# Altium footprint library Connectors.PcbLib: 305 footprints (part 19 of 20)
Each footprint in its own frame and in the unit in brackets; x right, y up, seen from the top. Pads: shape width x height; smd on the part's side, far side on the other; paste and mask are expansions set on the pad; w line width, h text height; cw(c..) or ccw(c..) is an arc to the next point about the centre after c.
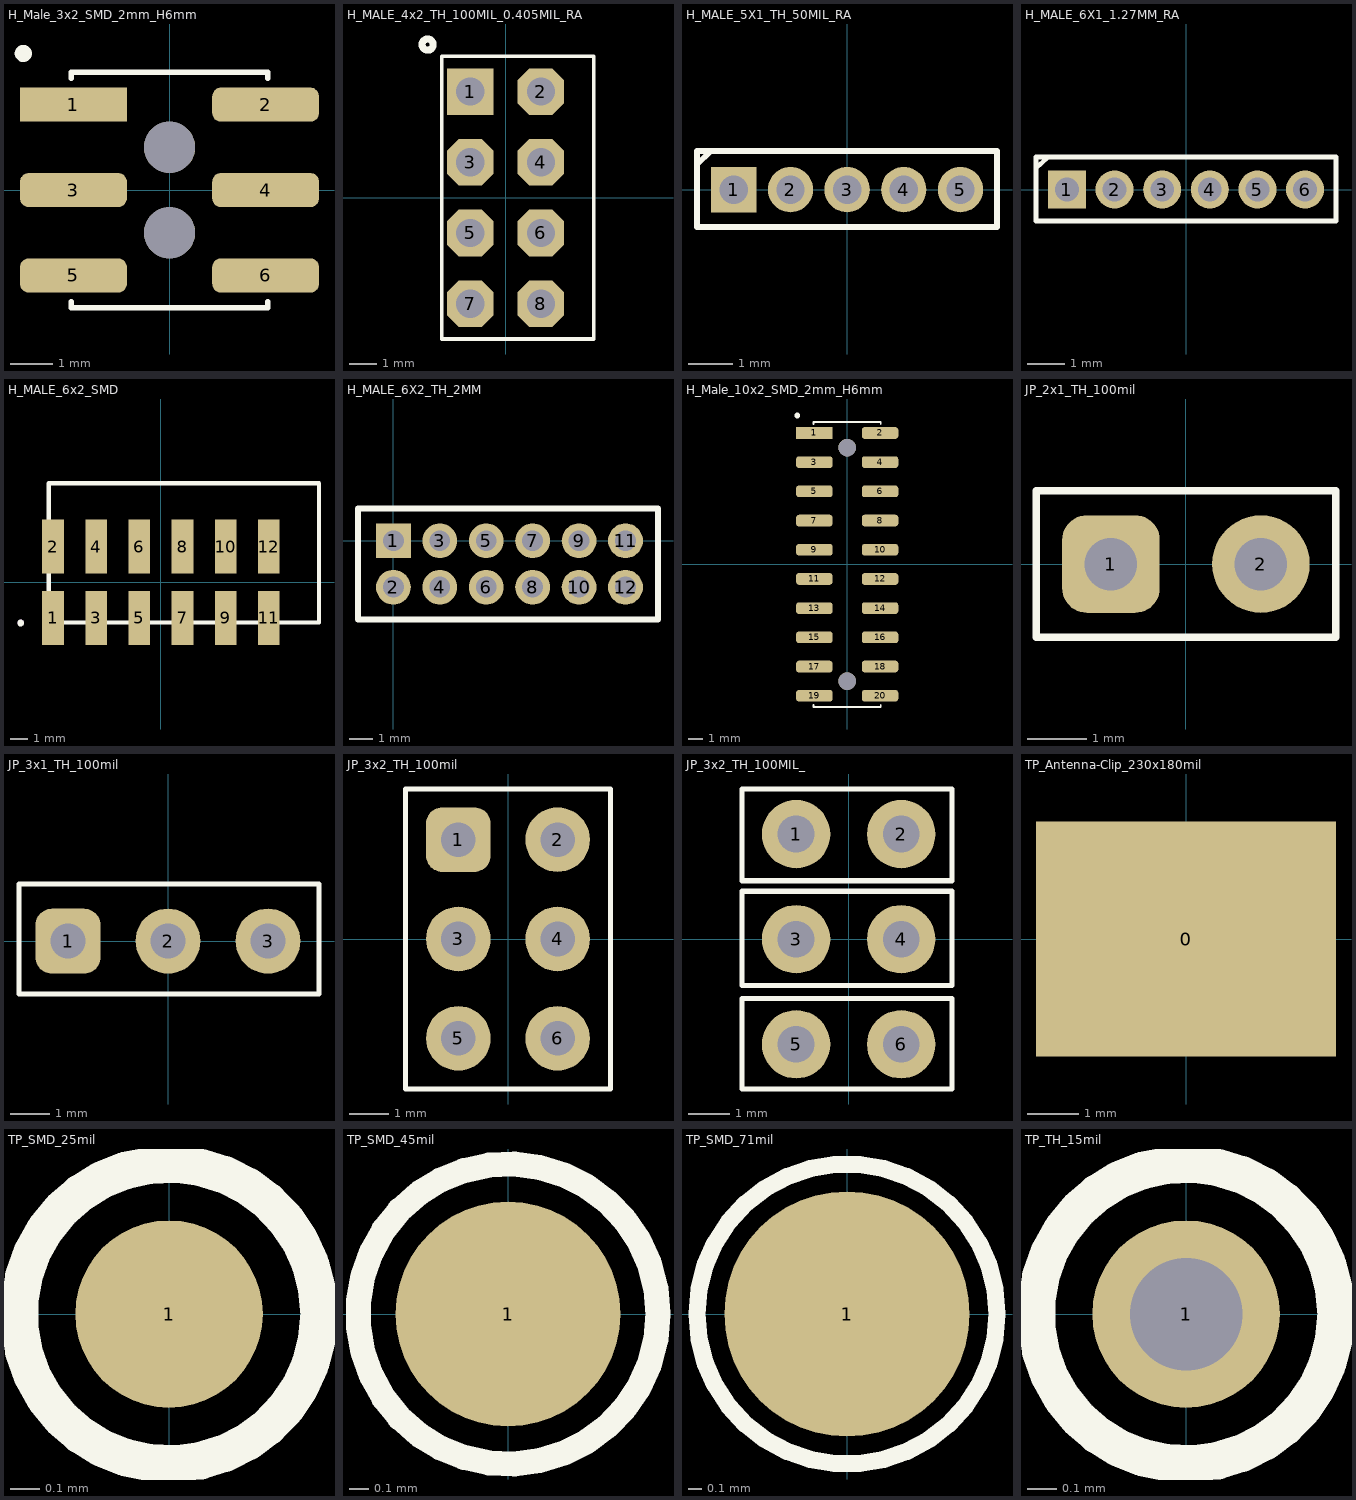
[diagram p18: the footprints below, top view; thin cyan lines are the x and y axes]

## H_Male_3x2_SMD_2mm_H6mm [mm] "/20230621/J-A.Sepulveda"
pads (8):
  rect 2.5x0.8 smd: 1(-2.25,2)
  rrect50% 2.5x0.8 smd: 2(2.25,2) 3(-2.25,0) 4(2.25,0) 5(-2.25,-2) 6(2.25,-2)
  round 1.2 hole 1.2 unplated: ""(0,-1) ""(0,1)
Top Overlay:
  circle w0.2: c-3.425,3.2 r0.1
  lines w0.127: -2.3,-2.62 -2.3,-2.76 2.3,-2.76 2.3,-2.62 ; -2.3,2.62 -2.3,2.76 2.3,2.76 2.3,2.62
3D body "PH2.0x1.5-2x3T B3.9 W6.5 E2.1.stp": height 6.02, standoff -1.34, extent -3.25,-3 3.25,3

## H_MALE_4x2_TH_100MIL_0.405MIL_RA [mil] "A-F. Romo / 20221019"
pads (8):
  rect 66x66 hole 40: 1(-50,150)
  oct 66x66 hole 40: 2(50,150) 3(-50,50) 4(50,50) 5(-50,-50) 6(50,-50) 7(-50,-150) 8(50,-150)
Top Overlay:
  circle w10: c-110.24,216.54 r7.87
  lines w5: -90,-200 -90,200 125,200 125,-200 -90,-200
3D body "929838-02-04.STEP": height 283.18, standoff -234.54, extent -90,-200 530.08,200

## H_MALE_5X1_TH_50MIL_RA [mil] "20220518 / E.Naranjo"
pads (5):
  rect 40x40 hole 25: 1(-100,0)
  round 40 hole 25: 2(-50,0) 3(0,0) 4(50,0) 5(100,0)
Top Overlay:
  lines w5: -132.48,22.5 -120,34 ; -132.48,-32.93 -132.48,34 132.28,34 132.28,-32.93 -132.48,-32.93
3D body "M50-3930542.STEP": height 83.18, standoff -93.99, extent -125.05,-7.87 125.05,216.54

## H_MALE_6X1_1.27MM_RA [mil] "20220516 / E.Naranjo"
pads (6):
  rect 40x40 hole 25: 1(-125,0)
  round 40 hole 25: 2(-75,0) 3(-25,0) 4(25,0) 5(75,0) 6(125,0)
Top Overlay:
  lines w5: -157.48,22.5 -145,34 ; -157.48,-32.93 -157.48,34 157.48,34 157.48,-32.93 -157.48,-32.93
3D body "M50-3930642.STEP": height 83.18, standoff -93.99, extent -150.66,-7.99 149.44,216.42

## H_MALE_6x2_SMD [mm] "/20221116/J.Jaramillo"
pads (12):
  rect 1.27x3.18 smd: 1(-6.35,-2.095) 2(-6.35,2.095) 3(-3.81,-2.095) 4(-3.81,2.095) 5(-1.27,-2.095) 6(-1.27,2.095) 7(1.27,-2.095) 8(1.27,2.095) 9(3.81,-2.095) 10(3.81,2.095) 11(6.35,-2.095) 12(6.35,2.095)
Top Overlay:
  circle w0.2: c-8.251,-2.401 r0.1
  lines w0.254: -6.601,-2.368 9.299,-2.368 9.299,5.832 -6.601,5.832 -6.601,-2.368
Top 3D Body (Mech13):
  lines w0.2: -8.351,-2.401 cw(c-8.251,-2.401) -8.153,-2.423
3D body "TSM-106-01-T-DH.stp": height 6.11, standoff 0.01, extent -7.619,-12.734 7.621,3.522

## H_MALE_6X2_TH_2MM [mm] "20230627 / E.Naranjo"
pads (12):
  rect 1.5x1.5 hole 0.9: 1(0,0)
  round 1.5 hole 0.9: 2(0,-2) 3(2,0) 4(2,-2) 5(4,0) 6(4,-2) 7(6,0) 8(6,-2) 9(8,0) 10(8,-2) 11(10,0) 12(10,-2)
Top Overlay:
  lines w0.254: -1.524,-1.905 -1.524,1.397 11.4,1.397 11.4,-3.4 -1.524,-3.4 -1.524,-0.635
3D body "10075024g0106ulf.stp": height 5.51, standoff -1.99, extent -1,-3 11,1

## H_Male_10x2_SMD_2mm_H6mm [mm] "/20230621/J-A.Sepulveda"
pads (22):
  rect 2.5x0.8 smd: 1(-2.25,9)
  rrect50% 2.5x0.8 smd: 2(2.25,9) 3(-2.25,7) 4(2.25,7) 5(-2.25,5) 6(2.25,5) 7(-2.25,3) 8(2.25,3) 9(-2.25,1) 10(2.25,1) 11(-2.25,-1) 12(2.25,-1) 13(-2.25,-3) 14(2.25,-3) 15(-2.25,-5) 16(2.25,-5) 17(-2.25,-7) 18(2.25,-7) 19(-2.25,-9) 20(2.25,-9)
  round 1.2 hole 1.2 unplated: ""(0,-8) ""(0,8)
Top Overlay:
  circle w0.2: c-3.425,10.2 r0.1
  lines w0.127: -2.3,-9.62 -2.3,-9.76 2.3,-9.76 2.3,-9.62 ; -2.3,9.62 -2.3,9.76 2.3,9.76 2.3,9.62
3D body "PH2.0x1.5-2x10T B3.9 W6.5 E2.1.stp": height 6.02, standoff -1.34, extent -3.25,-10 3.25,10

## JP_2x1_TH_100mil [mil] "/ 20190222 / C-A.Serna.A"
pads (2):
  rrect50% 65x65 hole 35: 1(-50,0)
  round 65 hole 35: 2(50,0)
Top Overlay:
  lines w5: -99.99,-48.99 -99.99,49.01 100.01,49.01 100.01,-48.99 -99.99,-48.99
3D body "H_2pos_2.54mm_022284020.stp": height 330.6, standoff -124.4, extent -99.99,-48.99 100.01,49.01
3D body "jumper 2_54mm.step": height 327.24, standoff 91.02, extent -98.42,-47.24 98.43,47.25

## JP_3x1_TH_100mil [mil] "/ 20190222 / C-A.Serna.A"
pads (3):
  rrect50% 65x65 hole 35: 1(-100,0)
  round 65 hole 35: 2(0,0) 3(100,0)
Top Overlay:
  lines w5: -149,-53 -149,57.23 151,57.23 151,-53 -149,-53
3D body "jumper 2_54mm.step": height 327.24, standoff 91.02, extent -144.42,-45.24 52.43,49.25
3D body "Header_3pos_unshrouded.STEP": height 335.25, standoff -117.51, extent -149,-53 151,57.23

## JP_3x2_TH_100mil [mil] "/ 20190411 / C-D Viveros"
pads (6):
  rrect50% 65x65 hole 35: 1(-50,100)
  round 65 hole 35: 2(50,100) 3(-50,0) 4(50,0) 5(-50,-100) 6(50,-100)
Top Overlay:
  lines w5: -103,-151 -103,151 103,151 103,-151 -103,-151
3D body "MNT-102-BK-G.stp": height 350.39, standoff 110.39, extent -100,-56.69 100,143.31
3D body "XG8T-0631.STEP": height 276.1, standoff -117.61, extent -98.42,-152.36 98.43,147.64

## JP_3x2_TH_100MIL_ [mil] "/ 20210215 / M-C.Calderon"
pads (6):
  round 65 hole 35: 1(-50,100) 2(50,100) 3(-50,0) 4(50,0) 5(-50,-100) 6(50,-100)
Top Overlay:
  lines w5: -101.57,-142.52 98.43,-142.52 98.43,-56.33 -101.57,-56.33 -101.57,-142.52 ; -101.57,-44.09 98.43,-44.09 98.43,45.67 -101.57,45.67 -101.57,-44.09 ; -101.57,55.51 98.43,55.51 98.43,142.91 -101.57,142.91 -101.57,55.51

## TP_Antenna-Clip_230x180mil [mil] "/ 20200722 / C-D Viveros"
pads (1):
  rect 230x180 smd: 0(0,0)
3D body "s8111-46r.stp": height 81.21, standoff 0.5, extent -100.39,-99.41 96.46,101.38

## TP_SMD_25mil [mm] "/ 20191219 / M-X.Arias"
pads (1):
  round 0.635 smd paste-0.508: 1(0,0)
Top Overlay:
  circle w0.127: c0,0 r0.508

## TP_SMD_45mil [mil] "/ 20191219 / M-X.Arias"
pads (1):
  round 45 smd paste-30: 1(0,0)
Top Overlay:
  circle w5: c0,0 r30

## TP_SMD_71mil [mm] "/ 20220808/ J-E.Pachon"
pads (1):
  round 1.8 smd paste-0.762: 1(0,0)
Top Overlay:
  circle w0.127: c0,0 r1.1

## TP_TH_15mil [mil] "/ 20190222 / C-A.Serna.A"
pads (1):
  round 25 hole 15: 1(0,0)
Top Overlay:
  circle w5: c0,0 r20
Bottom Overlay:
  circle w5: c0,0 r20